# Altium schematic symbol library Transistors.SchLib: 2 symbols
Pins are listed as number, name and electrical type; pins without a type are passive.

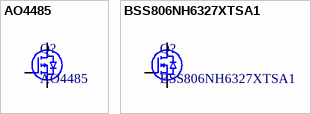
[diagram p0: symbols AO4485 to BSS806NH6327XTSA1]

## AO4485
designator Q?
Transistor: P-MOSFET; unipolar; -40V; -8A; 1.1W; SO8
footprint AO4485 (Transistor: P-MOSFET; unipolar; -40V; -8A; 1.1W; SO8); pin to pad 1>4 2>5+6+7+8 3>1+2+3
pins: 1 G, 2 D, 3 S

## BSS806NH6327XTSA1
designator Q?
Transistor: N-MOSFET; unipolar; 20V; 2.3A; 0.5W; SOT23
footprint BSS806NH6327XTSA1 (Transistor: N-MOSFET; unipolar; 20V; 2.3A; 0.5W; SOT23)
pins: 1 G, 2 D, 3 S